# Altium footprint library CHIP-Library.PcbLib: 345 footprints (part 15 of 22)
Each footprint in its own frame and in the unit in brackets; x right, y up, seen from the top. Pads: shape width x height; smd on the part's side, far side on the other; paste and mask are expansions set on the pad; w line width, h text height; cw(c..) or ccw(c..) is an arc to the next point about the centre after c.
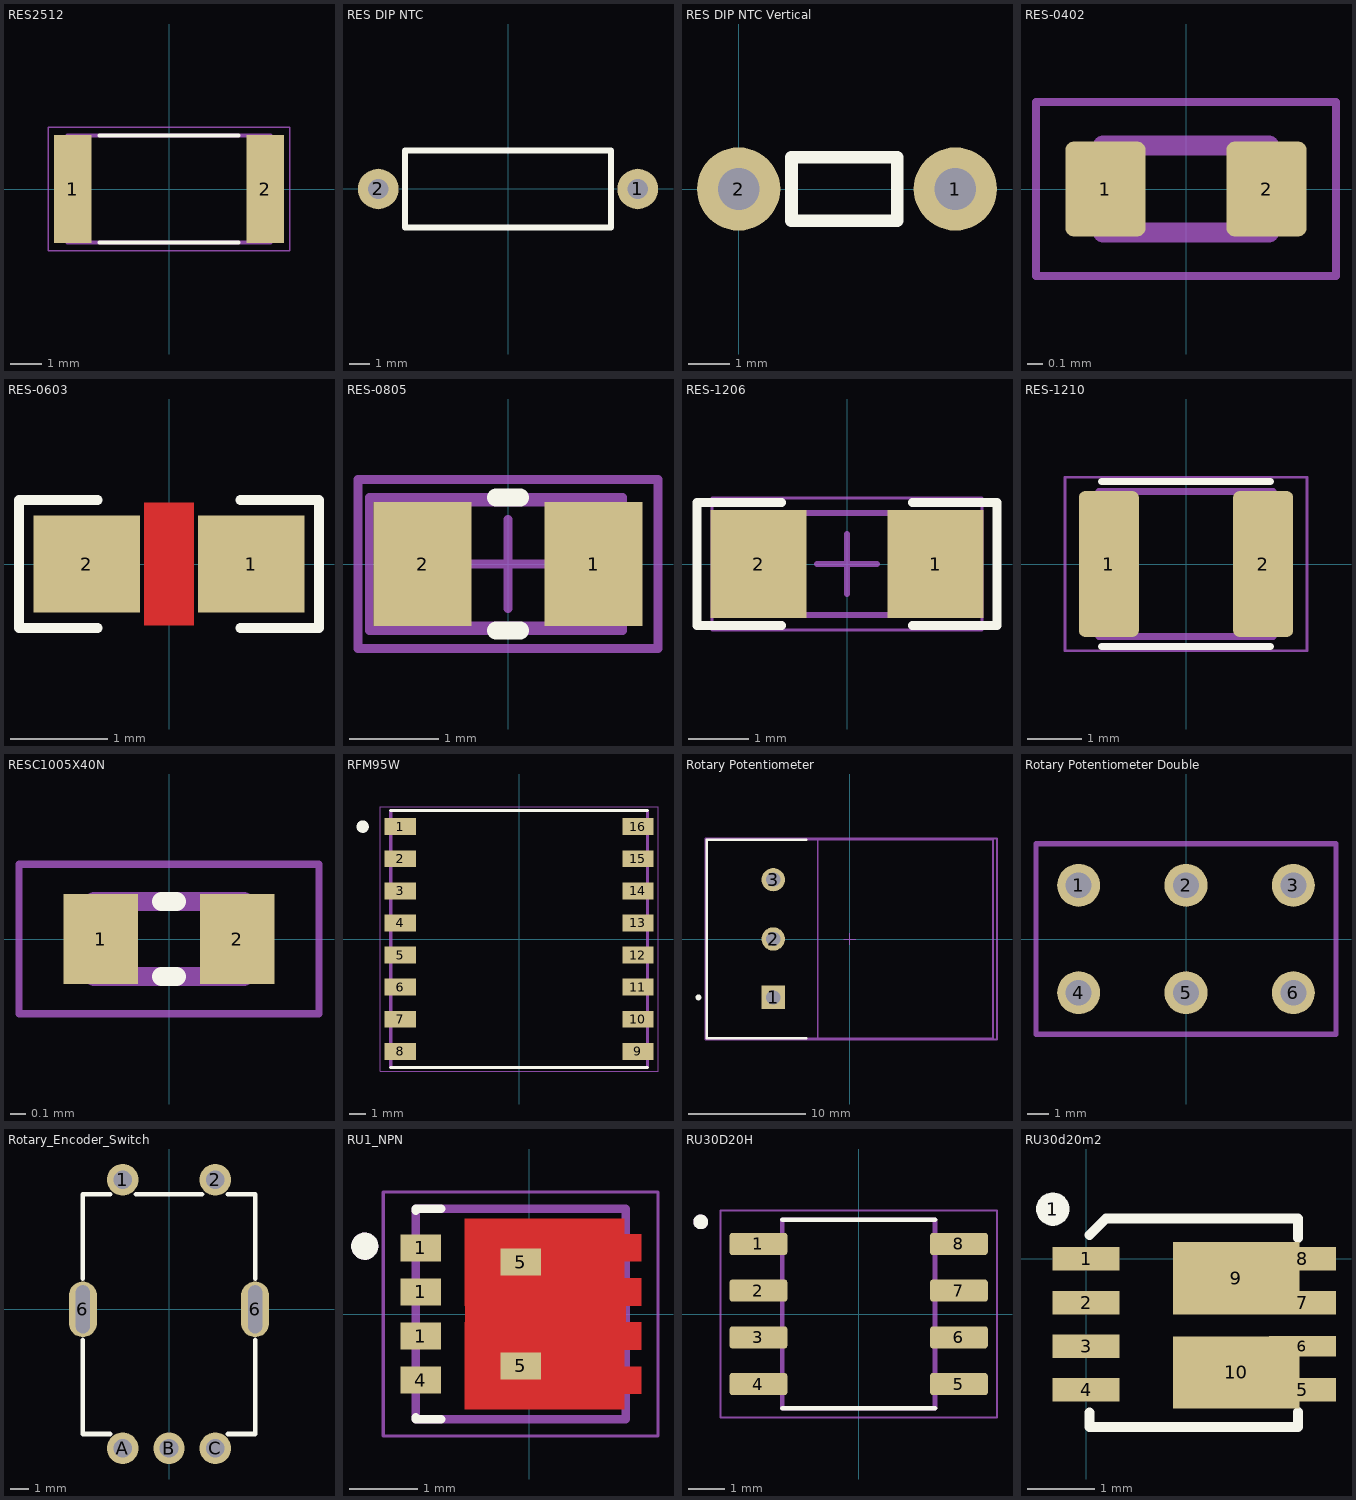
[diagram p14: the footprints below, top view; thin cyan lines are the x and y axes]

## RES2512 [mm]
pads (2):
  rect 1.2x3.42 smd: 1(-3.055,0) 2(3.055,0)
Top Overlay:
  lines w0.127: -2.2,-1.7 2.2,-1.7 ; -2.2,1.7 2.2,1.7
Mechanical 13:
  lines w0.127: -3.22,-1.7 -3.22,1.7 3.22,1.7 3.22,-1.7 -3.22,-1.7
Mechanical 15:
  lines w0.05: -3.84,-1.958 -3.84,1.958 3.84,1.958 3.84,-1.958 -3.84,-1.958
3D body "User Library-Resistors_SMD.step": height 0.72, standoff 0.01, extent -3.245,-1.6 3.055,1.6

## RES DIP NTC [mm]
pads (2):
  round 2 hole 1: 1(6.4,0) 2(-6.4,0)
Top Overlay:
  lines w0.305: -5.08,-1.905 -5.08,1.905 5.08,1.905 5.08,-1.905 -5.08,-1.905
3D body "User Library-Res50-Axial 0_5W-3_3R.step": height 6.38, standoff -3, extent -6.725,-1.845 6.725,1.905

## RES DIP NTC Vertical [mm]
pads (2):
  round 2 hole 1: 1(5.207,0) 2(0,0)
Top Overlay:
  lines w0.305: 1.27,-0.762 1.27,0.762 3.81,0.762 3.81,-0.762 1.27,-0.762 ; 3.81,0 3.81,0
3D body "R_0,5W_VERT__D3,2__L9__Pitch-5__Spacing-5.stp": height 13.5, standoff -6.6, extent -0.402,-1.524 6.498,1.676

## RES-0402 [mm]
pads (2):
  rrect20% 0.508x0.6 smd: 1(-0.51,0) 2(0.51,0)
Mechanical 13:
  lines w0.127: -0.525,-0.275 0.525,-0.275 0.525,0.275 -0.525,0.275 -0.525,-0.275
Mechanical 15:
  lines w0.05: -0.95,-0.55 0.95,-0.55 0.95,0.55 -0.95,0.55 -0.95,-0.55
3D body "R 0402.STEP": height 0.3, standoff 0, extent -0.5,-0.25 0.5,0.25

## RES-0603 [mm]
height 4.32
pads (2):
  rect 1.1x1 smd: 1(0.85,0) 2(-0.85,0)
Top Layer:
  pour cut-out: 0.254,0.635 -0.254,0.635 -0.254,-0.635 0.254,-0.635
Top Overlay:
  lines w0.1: -0.737,-0.66 -1.549,-0.66 -1.549,0 -1.549,0.66 -0.737,0.66 ; 0.737,-0.66 1.549,-0.66 1.549,0 1.549,0.66 0.737,0.66
3D body "User Library-TNPW0603.STEP": height 0.45, standoff 0, extent -0.8,-0.425 0.8,0.425

## RES-0805 [mm]
height 0.5
pads (2):
  rect 1.1x1.4 smd: 1(0.962,0) 2(-0.962,0)
Top Overlay:
  lines w0.2: -0.137,-0.75 0.138,-0.75 ; -0.137,0.75 0.138,0.75
Mechanical 13:
  lines w0.1: -1.213,-0.7 -1.213,0.7 0.937,0.7 0.937,-0.7 -1.213,-0.7
Mechanical 15:
  lines w0.1: -0.5,0 0.5,0 ; 0,-0.5 0,0.5 ; -1.69,-0.95 1.687,-0.95 1.687,0.95 -1.69,0.95 -1.69,-0.95 ; -1.563,-0.75 -1.563,0.75 1.287,0.75 1.287,-0.75 -1.563,-0.75
3D body "0805.STEP": height 0.6, standoff 0, extent -1.016,-0.635 1.016,0.635

## RES-1206 [mm]
height 0.94
pads (2):
  rect 1.6x1.8 smd: 1(1.475,0) 2(-1.475,0)
Top Overlay:
  lines w0.15: -1.088,-1.025 -2.5,-1.025 -2.5,1.025 -1.088,1.025 ; 1.088,-1.025 2.5,-1.025 2.5,1.025 1.088,1.025
Mechanical 13:
  lines w0.1: -1.65,-0.85 1.65,-0.85 1.65,0.85 -1.65,0.85 -1.65,-0.85
Mechanical 15:
  lines w0.05: -2.25,-1.1 2.25,-1.1 2.25,1.1 -2.25,1.1 -2.25,-1.1
  lines w0.1: -0.5,0 0.5,0 ; 0,-0.5 0,0.5
3D body "RES1206.step": height 0.94, standoff 0, extent -1.65,-0.85 1.65,0.85

## RES-1210 [mm]
pads (2):
  rrect20% 1.1x2.67 smd: 1(-1.415,0) 2(1.415,0)
Top Overlay:
  lines w0.127: -1.55,-1.515 1.55,-1.515 ; -1.55,1.515 1.55,1.515
Mechanical 13:
  lines w0.127: -1.6,-1.33 1.6,-1.33 1.6,1.33 -1.6,1.33 -1.6,-1.33
Mechanical 15:
  lines w0.05: -2.22,-1.59 2.22,-1.59 2.22,1.59 -2.22,1.59 -2.22,-1.59
3D body "2-1879463-5.stp": height 0.56, standoff 0.01, extent -1.6,-1.25 1.6,1.25

## RESC1005X40N [mm]
pads (2):
  rect 0.5x0.6 smd: 1(-0.455,0) 2(0.455,0)
Top Overlay:
  lines w0.127: -0.05,-0.25 0.05,-0.25 ; -0.05,0.25 0.05,0.25
Mechanical 4:
  region: -0.5,0.25 -0.3,0.25 -0.3,-0.25 -0.5,-0.25
  region: 0.3,0.25 0.5,0.25 0.5,-0.25 0.3,-0.25
  region: -0.5,0.25 -0.3,0.25 -0.3,-0.25 -0.5,-0.25
  region: 0.3,0.25 0.5,0.25 0.5,-0.25 0.3,-0.25
  lines w0.127: -0.5,-0.25 0.5,-0.25 ; -0.5,-0.25 -0.5,0.25 ; -0.5,-0.25 0.5,-0.25 ; -0.5,-0.25 -0.5,0.25 ; -0.5,0.25 0.5,0.25 ; -0.5,0.25 0.5,0.25 ; 0.5,-0.25 0.5,0.25 ; 0.5,-0.25 0.5,0.25
Mechanical 16:
  lines w0.05: -1,-0.5 1,-0.5 1,0.5 -1,0.5 -1,-0.5

## RFM95W [mm]
pads (16):
  rect 1.95x1.05 smd: 1(-7.4,7) 2(-7.4,5) 3(-7.4,3) 4(-7.4,1) 5(-7.4,-1) 6(-7.4,-3) 7(-7.4,-5) 8(-7.4,-7) 9(7.4,-7) 10(7.4,-5) 11(7.4,-3) 12(7.4,-1) 13(7.4,1) 14(7.4,3) 15(7.4,5) 16(7.4,7)
Top Overlay:
  circle w0.2: c-9.75,7 r0.292
  region: -10.011,7.2 -9.5,7.2 -9.5,6.808 -10.011,6.808
  lines w0.2: -8,-8 8,-8 ; -8,8 8,8
Mechanical 4:
  lines w0.2: -8,-8 -8,8 -8,-8 ; 8,-8 8,8 8,-8
Mechanical 16:
  lines w0.05: -8.65,-8.25 8.65,-8.25 8.65,8.25 -8.65,8.25 -8.65,-8.25
3D body "RFM95W-915S2--3DModel-STEP-56544.STEP": height 1.81, standoff 0.01, extent -8,-8 8,8

## Rotary Potentiometer [mm]
pads (3):
  rect 2x2 hole 1.2 paste-2539.97 mask+0: 1(-6.55,-5)
  round 2 hole 1.2 paste-2539.97 mask+0: 2(-6.55,0) 3(-6.55,5.08)
Top Overlay:
  circle w0.25: c-12.951,-5 r0.125
  lines w0.2: -3.7,-8.5 -12.25,-8.5 -12.25,8.5 -3.7,8.5
Bottom 3D Body:
  lines w0.2: -12.35,-8.6 12.6,-8.6 12.6,8.6 -12.35,8.6 -12.35,-8.6
  text ".Designator" at 0.125,0 h1
Dimensions:
  lines w0.15: -2.75,-8.6 -2.75,8.6 ; -12.25,-8.5 12.25,-8.5 12.25,8.5 -12.25,8.5 -12.25,-8.5
Mechanical 15:
  lines w0.1: -0.5,0 0.5,0 ; 0,-0.5 0,0.5
  lines w0.2: -12.35,-8.6 12.6,-8.6 12.6,8.6 -12.35,8.6 -12.35,-8.6
3D body "Rotary Potentiometer.STEP": height 21, standoff -3.75, extent -12.7,-8.05 15.3,8.05

## Rotary Potentiometer Double [mm]
pads (6):
  round 2 hole 1.2: 1(-5,2.5) 2(0,2.5) 3(5,2.5) 4(-5,-2.5) 5(0,-2.5) 6(5,-2.5)
Mechanical 1:
  lines w0.254: -6.985,-4.445 6.985,-4.445 6.985,4.445 -6.985,4.445 -6.985,-4.445

## Rotary_Encoder_Switch [mm]
pads (7):
  round 1.7 hole 1: 1(-2.5,7) 2(2.5,7) A(-2.5,-7.5) B(0,-7.5) C(2.5,-7.5)
  oval 1.524x3 hole 0.762 slot 2.6 at 90 deg: 6(-4.65,0) 6(4.65,0)
Top Overlay:
  lines w0.254: -4.65,-1.651 -4.65,-6.731 -3.175,-6.731 ; -4.65,1.651 -4.65,6.223 -3.175,6.223 ; -1.778,6.223 1.778,6.223 ; 3.175,-6.731 4.65,-6.731 4.65,-1.651 ; 3.175,6.223 4.65,6.223 4.65,1.651

## RU1_NPN [mm] "DFN_3*3"
pads (6):
  rect 0.6x0.4 smd: 1(-1.602,-0.325) 1(-1.602,0.325) 1(-1.602,0.975) 4(-1.602,-0.975)
  rect 0.6x0.4 smd paste-1 mask+0: 5(-0.127,-0.765) 5(-0.127,0.765)
Top Layer:
  rectangle: -0.952,-0.42 1.423,0.42
  region: 1.398,1.175 1.648,1.175 1.648,0.775 1.398,0.775 1.398,0.525 1.648,0.525 1.648,0.125 -0.952,0.125 -0.952,1.405 1.398,1.405
  region: 1.648,-0.525 1.398,-0.525 1.398,-0.775 1.648,-0.775 1.648,-1.175 1.398,-1.175 1.398,-1.405 -0.952,-1.405 -0.952,-0.125 1.648,-0.125
Top Overlay:
  circle w0.2: c-2.427,1 r0.1
  lines w0.127: -1.677,-1.525 -1.677,-1.55 -1.302,-1.55 ; -1.677,1.525 -1.677,1.55 -1.302,1.55
Top Paste:
  region: 0.123,0.42 -0.757,0.42 -0.757,1.11 0.123,1.11
  region: 1.203,0.42 0.323,0.42 0.323,1.11 1.203,1.11
  region: 0.123,-1.11 -0.757,-1.11 -0.757,-0.42 0.123,-0.42
  region: 1.203,-1.11 0.323,-1.11 0.323,-0.42 1.203,-0.42
  region: 1.648,0.775 1.403,0.775 1.403,1.175 1.648,1.175
  region: 1.648,0.125 1.403,0.125 1.403,0.525 1.648,0.525
  region: 1.648,-0.525 1.403,-0.525 1.403,-0.125 1.648,-0.125
  region: 1.648,-1.175 1.403,-1.175 1.403,-0.775 1.648,-0.775
Top Solder:
  region: 1.498,1.275 1.748,1.275 1.748,0.675 1.498,0.675 1.498,0.625 1.748,0.625 1.748,0.025 -1.052,0.025 -1.052,1.505 1.498,1.505
  region: 1.748,-0.625 1.498,-0.625 1.498,-0.675 1.748,-0.675 1.748,-1.275 1.498,-1.275 1.498,-1.505 -1.052,-1.505 -1.052,0.42 1.748,0.42
Mechanical 13:
  circle w0.2: c-2.427,1 r0.1
  lines w0.127: -1.677,-1.55 -1.677,1.55 1.423,1.55 1.423,-1.55 -1.677,-1.55
Mechanical 15:
  lines w0.05: -2.152,-1.8 -2.152,1.8 1.898,1.8 1.898,-1.8 -2.152,-1.8
3D body "step_temp.STEP": height 0.8, standoff 0, extent -1.802,-1.6 1.548,1.6

## RU30D20H [mm] "Dual N Mosfet SOP-8"
pads (8):
  rrect25% 1.57x0.6 smd: 1(-2.725,1.905) 2(-2.725,0.635) 3(-2.725,-0.635) 4(-2.725,-1.905) 5(2.725,-1.905) 6(2.725,-0.635) 7(2.725,0.635) 8(2.725,1.905)
Top Overlay:
  circle w0.2: c-4.295,2.505 r0.1
  lines w0.127: -2.075,-2.565 2.075,-2.565 ; -2.075,2.565 2.075,2.565
Mechanical 13:
  circle w0.2: c-4.295,2.505 r0.1
  lines w0.127: -2.075,-2.565 -2.075,2.565 2.075,2.565 2.075,-2.565 -2.075,-2.565
Mechanical 15:
  lines w0.05: -3.76,-2.815 -3.76,2.815 3.76,2.815 3.76,-2.815 -3.76,-2.815
3D body "step_temp.STEP": height 1.79, standoff -0.01, extent -3,-2.46 3,2.46

## RU30d20m2 [mm] "PDFN3333"
height 2.65
pads (11):
  round 0.5 on Top Overlay: 1(-0.495,0.74)
  rect 1x0.35 smd: 1(0,0) 2(0,-0.65) 3(0,-1.3) 4(0,-1.95) 5(3.216,-1.95) 7(3.216,-0.65) 8(3.216,0)
  rect 1x0.3 smd: 6(3.216,-1.3)
  rect 1.88x1.075 smd: 9(2.232,-0.29) 10(2.232,-1.69)
Top Overlay:
  lines w0.15: 0.052,-2.5 3.152,-2.5 ; 0.052,0.355 0.297,0.6 3.152,0.6 3.152,0.31
  lines w0.152: 0.052,-2.5 0.052,-2.29 ; 3.152,-2.5 3.152,-2.28
3D body "step_temp.STEP": height 0.8, standoff 0, extent -0.024,-2.55 3.326,0.65